# Altium footprint library PCB_PTUController.PcbLib: 106 footprints (part 4 of 7)
Each footprint in its own frame and in the unit in brackets; x right, y up, seen from the top. Pads: shape width x height; smd on the part's side, far side on the other; paste and mask are expansions set on the pad; w line width, h text height; cw(c..) or ccw(c..) is an arc to the next point about the centre after c.
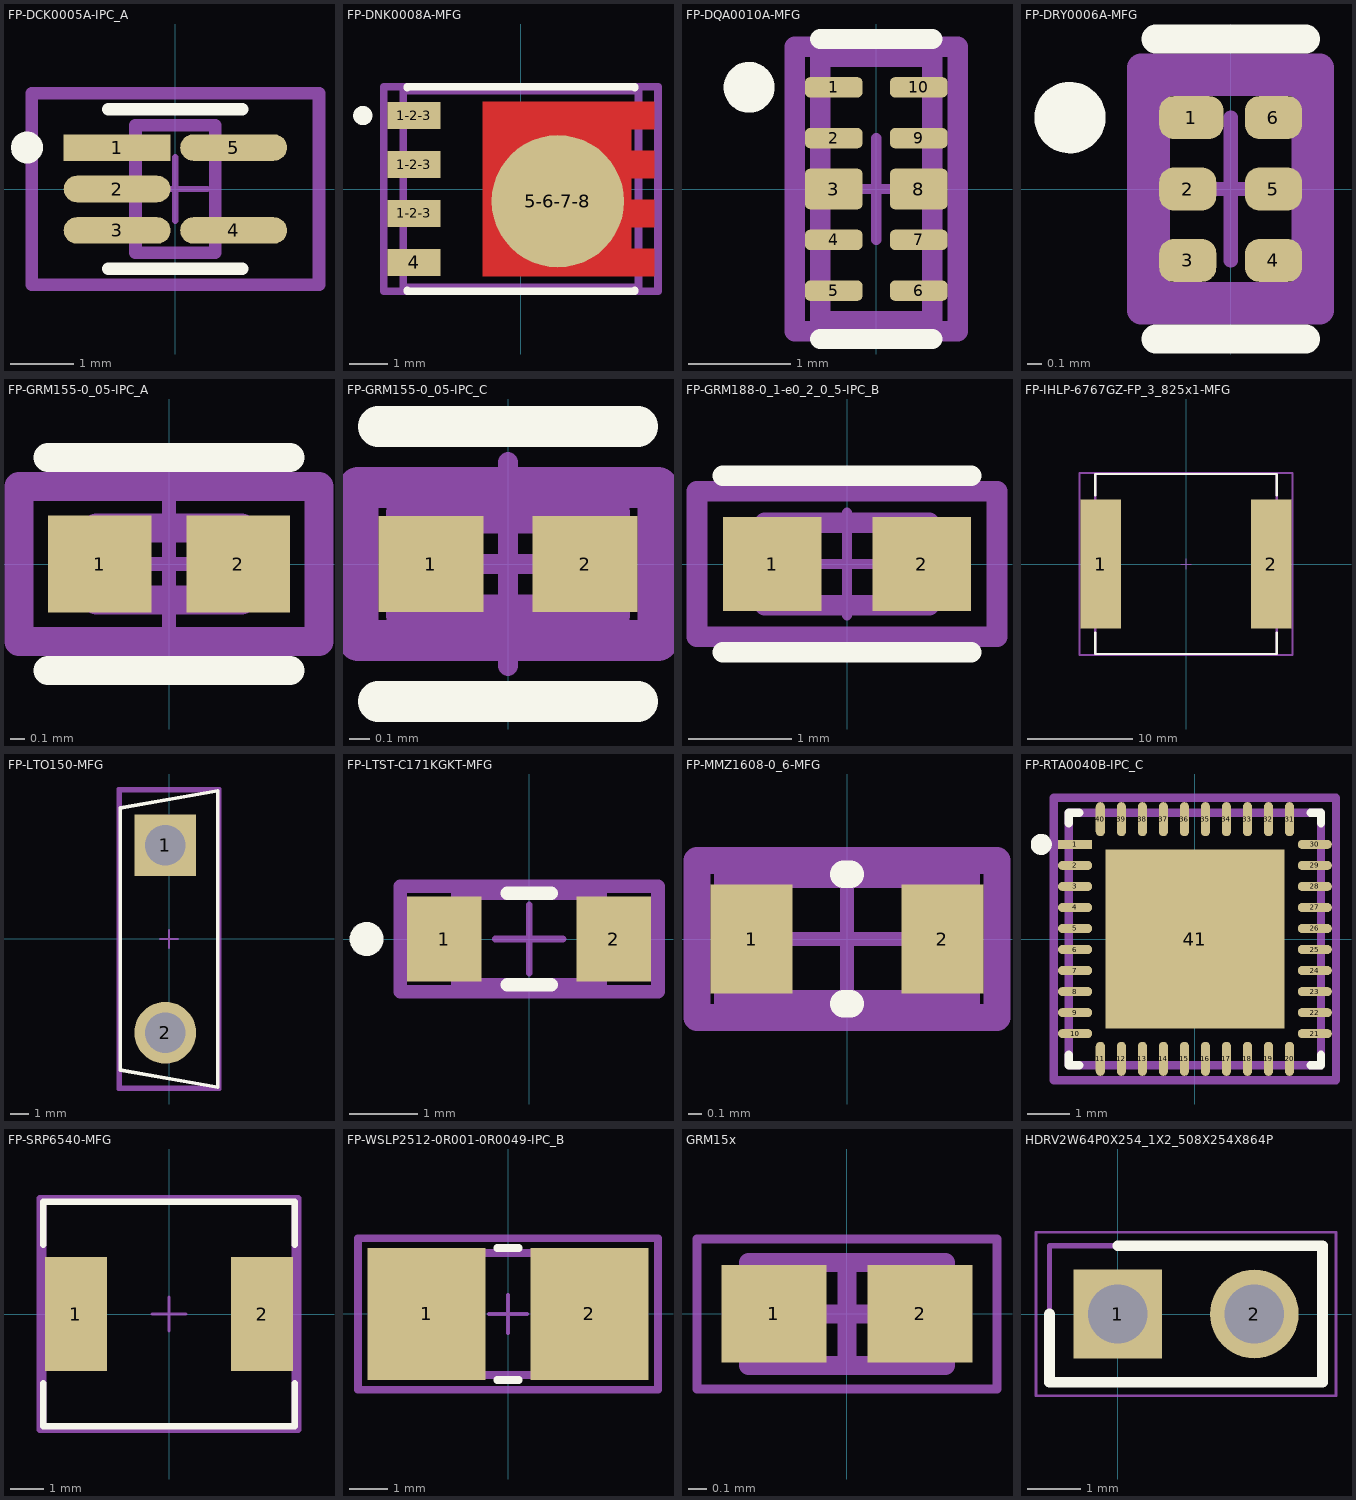
[diagram p3: the footprints below, top view; thin cyan lines are the x and y axes]

## FP-DCK0005A-IPC_A [mm]
pads (5):
  rect 1.677x0.416 smd paste+0 mask+0: 1(-0.914,0.65)
  rrect100% 1.677x0.416 smd paste+0 mask+0: 2(-0.914,0) 3(-0.914,-0.65) 4(0.914,-0.65) 5(0.914,0.65)
Top Overlay:
  circle w0.25: c-2.327,0.65 r0.125
  lines w0.2: -1.05,-1.25 1.05,-1.25 ; -1.05,1.25 1.05,1.25
Top Assembly:
  lines w0.2: -2.252,-1.5 2.252,-1.5 2.252,1.5 -2.252,1.5 -2.252,-1.5
  text ".Designator" at 0,0 h1
Top 3D Body:
  lines w0.2: -0.625,-1 0.625,-1 0.625,1 -0.625,1 -0.625,-1
Top Courtyard:
  lines w0.2: -2.252,-1.5 2.252,-1.5 2.252,1.5 -2.252,1.5 -2.252,-1.5
Top Component Center:
  lines w0.1: -0.5,0 0.5,0 ; 0,-0.5 0,0.5
3D body "IC_Texas_Instruments_SN74AUC1G125DCKR_eec.STEP": height 0.25, standoff 0, extent -2.252,-1.5 2.252,1.5

## FP-DNK0008A-MFG [mm]
pads (5):
  rect 1.372x0.71 smd paste-1000 mask+0: 1-2-3(-2.77,-0.635) 1-2-3(-2.77,0.635) 1-2-3(-2.77,1.905) 4(-2.77,-1.905)
  round 3.434 smd paste-1000 mask+0: 5-6-7-8(0.958,-0.318)
Top Layer:
  region: -0.984,-2.26 3.456,-2.26 3.456,-1.55 2.866,-1.55 2.866,-0.99 3.456,-0.99 3.456,-0.28 2.866,-0.28 2.866,0.28 3.456,0.28 3.456,0.99 2.866,0.99 2.866,1.55 3.456,1.55 3.456,2.26 -0.984,2.26
Top Overlay:
  circle w0.25: c-4.1,1.905 r0.125
  lines w0.2: -2.95,-2.635 -2.95,-2.65 2.95,-2.65 2.95,-2.635 ; -2.95,2.635 -2.95,2.65 2.95,2.65 2.95,2.635
Top Paste:
  rectangle: -3.293,1.624 -2.221,2.186
  rectangle: -3.293,0.354 -2.221,0.916
  rectangle: -3.293,-0.916 -2.221,-0.354
  rectangle: -3.293,-2.186 -2.221,-1.624
  rectangle: 2.527,1.651 3.293,2.159
  rectangle: 2.527,0.381 3.293,0.889
  rectangle: 2.527,-0.889 3.293,-0.381
  rectangle: 2.527,-2.159 3.293,-1.651
  rectangle: 0.947,1.196 2.241,1.942
  rectangle: 0.947,0.15 2.241,0.896
  rectangle: 0.947,-0.896 2.241,-0.15
  rectangle: 0.947,-1.942 2.241,-1.196
  rectangle: -0.697,1.196 0.597,1.942
  rectangle: -0.697,0.15 0.597,0.896
  rectangle: -0.697,-0.896 0.597,-0.15
  rectangle: -0.697,-1.942 0.597,-1.196
Top Assembly:
  lines w0.2: -3.556,-2.65 3.556,-2.65 3.556,2.65 -3.556,2.65 -3.556,-2.65
  text ".Designator" at 0,0 h1
Top 3D Body:
  lines w0.2: -3.05,-2.55 3.05,-2.55 3.05,2.55 -3.05,2.55 -3.05,-2.55
Top Courtyard:
  lines w0.2: -3.556,-2.65 3.556,-2.65 3.556,2.65 -3.556,2.65 -3.556,-2.65
Top Component Center:
  lines w0.1: -0.5,0 0.5,0 ; 0,-0.5 0,0.5
3D body "Trans_Texas_Instruments_CSD19532Q5B_eec.STEP": height 0.25, standoff 0, extent -3.556,-2.65 3.556,2.65

## FP-DQA0010A-MFG [mm]
pads (10):
  rrect50% 0.565x0.2 smd paste+0 mask+0: 1(-0.417,1) 2(-0.417,0.5) 4(-0.417,-0.5) 5(-0.417,-1) 6(0.417,-1) 7(0.417,-0.5) 9(0.417,0.5) 10(0.417,1)
  rrect25% 0.565x0.4 smd paste-1000 mask+0: 3(-0.417,0) 8(0.417,0)
Top Overlay:
  circle w0.25: c-1.25,1 r0.125
  lines w0.2: -0.55,-1.475 0.55,-1.475 ; -0.55,1.475 0.55,1.475
Top Paste:
  region: -0.65,-0.18 -0.66,-0.18 -0.678,-0.172 -0.692,-0.158 -0.7,-0.14 -0.7,-0.13 -0.7,0.13 -0.7,0.14 -0.692,0.158 -0.678,0.172 -0.66,0.18 -0.65,0.18 -0.185,0.18 -0.175,0.18 -0.157,0.172 -0.143,0.158 -0.135,0.14 -0.135,0.13 -0.135,-0.13 -0.135,-0.14 -0.143,-0.158 -0.157,-0.172 -0.175,-0.18 -0.185,-0.18
  region: 0.7,0.13 0.7,-0.13 0.7,-0.14 0.692,-0.158 0.678,-0.172 0.66,-0.18 0.65,-0.18 0.185,-0.18 0.175,-0.18 0.157,-0.172 0.143,-0.158 0.135,-0.14 0.135,-0.13 0.135,0.13 0.135,0.14 0.143,0.158 0.157,0.172 0.175,0.18 0.185,0.18 0.65,0.18 0.66,0.18 0.678,0.172 0.692,0.158 0.7,0.14
Top Assembly:
  lines w0.2: -0.8,-1.4 0.8,-1.4 0.8,1.4 -0.8,1.4 -0.8,-1.4
  text ".Designator" at 0,0.188 h1
Top 3D Body:
  lines w0.2: -0.55,-1.3 0.55,-1.3 0.55,1.3 -0.55,1.3 -0.55,-1.3
Top Courtyard:
  lines w0.2: -0.8,-1.4 0.8,-1.4 0.8,1.4 -0.8,1.4 -0.8,-1.4
Top Component Center:
  lines w0.1: -0.5,0 0.5,0 ; 0,-0.5 0,0.5
3D body "Diode_Texas_Instruments_ESD204DQAR_eec.STEP": height 0.25, standoff 0, extent -0.8,-1.4 0.8,1.4

## FP-DRY0006A-MFG [mm]
pads (6):
  rrect67% 0.45x0.3 smd paste-1000 mask-1000: 1(-0.275,0.5)
  rrect67% 0.4x0.3 smd paste-1000 mask-1000: 2(-0.3,0) 3(-0.3,-0.5) 4(0.3,-0.5) 5(0.3,0) 6(0.3,0.5)
Top Overlay:
  circle w0.25: c-1.125,0.5 r0.125
  lines w0.2: -0.525,-1.05 0.525,-1.05 ; -0.525,1.05 0.525,1.05
Top Paste:
  drawing of 7 lines, arcs and shapes, not listed
Top Solder:
  drawing of 6 lines, arcs and shapes, not listed
Top Assembly:
  lines w0.2: -0.625,-0.85 0.625,-0.85 0.625,0.85 -0.625,0.85 -0.625,-0.85
  text ".Designator" at 0,0.188 h1
Top 3D Body:
  lines w0.2: -0.525,-0.75 0.525,-0.75 0.525,0.75 -0.525,0.75 -0.525,-0.75
Top Courtyard:
  lines w0.2: -0.625,-0.85 0.625,-0.85 0.625,0.85 -0.625,0.85 -0.625,-0.85
Top Component Center:
  lines w0.1: -0.5,0 0.5,0 ; 0,-0.5 0,0.5
3D body "IC_Texas_Instruments_TLV4062DRYR_eec.STEP": height 0.6, standoff 0, extent -0.5,-0.725 0.5,0.725

## FP-GRM155-0_05-IPC_A [mm]
pads (2):
  rect 0.715x0.672 smd paste+0 mask+0: 1(-0.479,0) 2(0.479,0)
Top Overlay:
  lines w0.2: -0.836,-0.736 0.836,-0.736 ; -0.836,0.736 0.836,0.736
Top Assembly:
  lines w0.2: -1.036,-0.536 1.036,-0.536 1.036,0.536 -1.036,0.536 -1.036,-0.536
  text ".Designator" at 0,0.188 h1
Top 3D Body:
  lines w0.2: -0.5,-0.25 0.5,-0.25 0.5,0.25 -0.5,0.25 -0.5,-0.25
Top Courtyard:
  lines w0.2: -1.036,-0.536 1.036,-0.536 1.036,0.536 -1.036,0.536 -1.036,-0.536
Top Component Center:
  lines w0.1: -0.5,0 0.5,0 ; 0,-0.5 0,0.5
3D body "Cap_Murata_GRM1552C1H271GA01J_eec.STEP": height 0.25, standoff 0, extent -1.036,-0.536 1.036,0.536

## FP-GRM155-0_05-IPC_C [mm]
pads (2):
  rect 0.515x0.472 smd paste+0 mask+0: 1(-0.379,0) 2(0.379,0)
Top Overlay:
  lines w0.2: -0.636,-0.675 0.636,-0.675 ; -0.636,0.675 0.636,0.675
Top Assembly:
  lines w0.2: -0.736,-0.375 -0.736,0.375 0.736,0.375 0.736,-0.375 -0.736,-0.375
  text ".Designator" at 0,0.188 h1
Top 3D Body:
  lines w0.2: -0.5,-0.25 -0.5,0.25 0.5,0.25 0.5,-0.25 -0.5,-0.25
Top Courtyard:
  lines w0.2: -0.736,-0.375 -0.736,0.375 0.736,0.375 0.736,-0.375 -0.736,-0.375
Top Component Center:
  lines w0.1: -0.5,0 0.5,0 ; 0,-0.5 0,0.5
3D body "Cap_Murata_GRM1552C1H271GA01J_eec.STEP": height 0.25, standoff 0, extent -0.736,-0.375 0.736,0.375

## FP-GRM188-0_1-e0_2_0_5-IPC_B [mm]
pads (2):
  rect 0.959x0.912 smd paste+0 mask+0: 1(-0.727,0) 2(0.727,0)
Top Overlay:
  lines w0.2: -1.206,-0.856 1.206,-0.856 ; -1.206,0.856 1.206,0.856
Top Assembly:
  lines w0.2: -1.456,-0.706 1.456,-0.706 1.456,0.706 -1.456,0.706 -1.456,-0.706
  text ".Designator" at 0,0.188 h1
Top 3D Body:
  lines w0.2: -0.8,-0.4 0.8,-0.4 0.8,0.4 -0.8,0.4 -0.8,-0.4
Top Courtyard:
  lines w0.2: -1.456,-0.706 1.456,-0.706 1.456,0.706 -1.456,0.706 -1.456,-0.706
Top Component Center:
  lines w0.1: -0.5,0 0.5,0 ; 0,-0.5 0,0.5
3D body "Cap_Murata_GRM188R61E225KA12D_eec.STEP": height 0.25, standoff 0, extent -1.456,-0.706 1.456,0.706

## FP-IHLP-6767GZ-FP_3_825x1-MFG [mm]
pads (2):
  rect 3.825x12.32 smd paste+0 mask+0: 1(-8.117,0) 2(8.117,0)
Top Overlay:
  lines w0.2: -8.638,-6.535 -8.638,-8.575 8.638,-8.575 8.638,-6.535 ; -8.638,6.535 -8.638,8.575 8.638,8.575 8.638,6.535
Top Assembly:
  lines w0.2: -10.13,-8.675 10.13,-8.675 10.13,8.675 -10.13,8.675 -10.13,-8.675
  text ".Designator" at 0,0.188 h1
Top 3D Body:
  lines w0.2: -8.638,-8.575 8.638,-8.575 8.638,8.575 -8.638,8.575 -8.638,-8.575
Top Courtyard:
  lines w0.2: -10.13,-8.675 10.13,-8.675 10.13,8.675 -10.13,8.675 -10.13,-8.675
Top Component Center:
  lines w0.1: -0.5,0 0.5,0 ; 0,-0.5 0,0.5
3D body "Ind_Vishay_IHLP6767GZER1R5M11_eec.STEP": height 0.25, standoff 0, extent -10.13,-8.675 10.13,8.675

## FP-LTO150-MFG [mm]
pads (2):
  rect 3.35x3.35 hole 2.2 paste-2539.97 mask+0: 1(-0.2,5.08)
  round 3.35 hole 2.2 paste-2539.97 mask+0: 2(-0.2,-5.08)
Top Overlay:
  lines w0.2: -2.65,-7.1 2.65,-8.03 2.65,8.03 -2.65,7.1 -2.65,-7.1
Top Assembly:
  lines w0.2: -2.75,-8.13 -2.75,8.13 2.75,8.13 2.75,-8.13 -2.75,-8.13
  text ".Designator" at 0,0 h1
Top 3D Body:
  lines w0.2: -2.65,-8.03 -2.65,8.03 2.65,8.03 2.65,-8.03 -2.65,-8.03
Top Courtyard:
  lines w0.2: -2.75,-8.13 -2.75,8.13 2.75,8.13 2.75,-8.13 -2.75,-8.13
Top Component Center:
  lines w0.1: -0.5,0 0.5,0 ; 0,-0.5 0,0.5
3D body "Res_Vishay_LTO150F1R000JTE3_eec.STEP": height 0.25, standoff 0, extent -2.75,-8.13 2.75,8.13

## FP-LTST-C171KGKT-MFG [mm]
pads (2):
  rect 1.1x1.25 smd paste+0 mask+0: 1(-1.25,0) 2(1.25,0)
Top Overlay:
  circle w0.25: c-2.4,0 r0.125
  lines w0.2: -0.325,-0.675 0.325,-0.675 ; -0.325,0.675 0.325,0.675
Top Assembly:
  lines w0.2: -1.9,-0.775 1.9,-0.775 1.9,0.775 -1.9,0.775 -1.9,-0.775
  text ".Designator" at 0,0 h1
Top 3D Body:
  lines w0.2: -1.05,-0.675 1.05,-0.675 1.05,0.675 -1.05,0.675 -1.05,-0.675
Top Courtyard:
  lines w0.2: -1.9,-0.775 1.9,-0.775 1.9,0.775 -1.9,0.775 -1.9,-0.775
Top Component Center:
  lines w0.1: -0.5,0 0.5,0 ; 0,-0.5 0,0.5
3D body "Diode_Lite-On_LTST-C171KGKT_eec.STEP": height 0.25, standoff 0, extent -1.9,-0.775 1.9,0.775

## FP-MMZ1608-0_6-MFG [mm]
pads (2):
  rect 0.6x0.8 smd paste+0 mask+0: 1(-0.7,0) 2(0.7,0)
Top Overlay:
  lines w0.2: -0.025,-0.475 0.025,-0.475 ; -0.025,0.475 0.025,0.475
Top Assembly:
  lines w0.2: -1.1,-0.575 1.1,-0.575 1.1,0.575 -1.1,0.575 -1.1,-0.575
  text ".Designator" at 0,0.188 h1
Top 3D Body:
  lines w0.2: -0.875,-0.475 0.875,-0.475 0.875,0.475 -0.875,0.475 -0.875,-0.475
Top Courtyard:
  lines w0.2: -1.1,-0.575 1.1,-0.575 1.1,0.575 -1.1,0.575 -1.1,-0.575
Top Component Center:
  lines w0.1: -0.5,0 0.5,0 ; 0,-0.5 0,0.5
3D body "FBead_TDK_MMZ1608B121CTAH0_eec.STEP": height 0.25, standoff 0, extent -1.1,-0.575 1.1,0.575

## FP-RTA0040B-IPC_C [mm]
pads (41):
  rect 0.81x0.219 smd paste+0 mask+0: 1(-2.851,2.25)
  rrect100% 0.81x0.219 smd paste+0 mask+0: 2(-2.851,1.75) 3(-2.851,1.25) 4(-2.851,0.75) 5(-2.851,0.25) 6(-2.851,-0.25) 7(-2.851,-0.75) 8(-2.851,-1.25) 9(-2.851,-1.75) 10(-2.851,-2.25) 21(2.851,-2.25) 22(2.851,-1.75) 23(2.851,-1.25) 24(2.851,-0.75) 25(2.851,-0.25) 26(2.851,0.25) 27(2.851,0.75) 28(2.851,1.25) 29(2.851,1.75) 30(2.851,2.25)
  rrect100% 0.219x0.81 smd paste+0 mask+0: 11(-2.25,-2.851) 12(-1.75,-2.851) 13(-1.25,-2.851) 14(-0.75,-2.851) 15(-0.25,-2.851) 16(0.25,-2.851) 17(0.75,-2.851) 18(1.25,-2.851) 19(1.75,-2.851) 20(2.25,-2.851) 31(2.25,2.851) 32(1.75,2.851) 33(1.25,2.851) 34(0.75,2.851) 35(0.25,2.851) 36(-0.25,2.851) 37(-0.75,2.851) 38(-1.25,2.851) 39(-1.75,2.851) 40(-2.25,2.851)
  rect 4.25x4.25 smd paste-1000 mask+0: 41(0,0)
Top Overlay:
  circle w0.25: c-3.656,2.25 r0.125
  lines w0.2: -3,-2.75 -3,-3 -2.75,-3 ; -3,2.75 -3,3 -2.75,3 ; 2.75,-3 3,-3 3,-2.75 ; 2.75,3 3,3 3,2.75
Top Paste:
  rectangle: -1.344,-1.344 1.344,1.344
Top Assembly:
  lines w0.2: -3.356,-3.356 -3.356,3.356 3.356,3.356 3.356,-3.356 -3.356,-3.356
  text ".Designator" at 0,0.188 h1
Top 3D Body:
  lines w0.2: -3,-3 -3,3 3,3 3,-3 -3,-3
Top Courtyard:
  lines w0.2: -3.356,-3.356 -3.356,3.356 3.356,3.356 3.356,-3.356 -3.356,-3.356
Top Component Center:
  lines w0.1: -0.5,0 0.5,0 ; 0,-0.5 0,0.5
3D body "IC_Texas_Instruments_DRV8323SRTAT_eec.STEP": height 0.25, standoff 0, extent -3.356,-3.356 3.356,3.356

## FP-SRP6540-MFG [mm]
pads (2):
  rect 1.85x3.4 smd paste+0 mask+0: 1(-2.775,0) 2(2.775,0)
Top Overlay:
  lines w0.2: -3.75,-2.075 -3.75,-3.35 3.75,-3.35 3.75,-2.075 ; -3.75,2.075 -3.75,3.35 3.75,3.35 3.75,2.075
Top Assembly:
  lines w0.2: -3.85,-3.45 3.85,-3.45 3.85,3.45 -3.85,3.45 -3.85,-3.45
  text ".Designator" at 0,0.188 h1
Top 3D Body:
  lines w0.2: -3.75,-3.35 3.75,-3.35 3.75,3.35 -3.75,3.35 -3.75,-3.35
Top Courtyard:
  lines w0.2: -3.85,-3.45 3.85,-3.45 3.85,3.45 -3.85,3.45 -3.85,-3.45
Top Component Center:
  lines w0.1: -0.5,0 0.5,0 ; 0,-0.5 0,0.5
3D body "Ind_Bourns_SRP6540-1R5M_eec.STEP": height 0.25, standoff 0, extent -3.85,-3.45 3.85,3.45

## FP-WSLP2512-0R001-0R0049-IPC_B [mm]
pads (2):
  rect 3.072x3.439 smd paste+0 mask+0: 1(-2.119,0) 2(2.119,0)
Top Overlay:
  lines w0.2: -0.283,-1.719 0.283,-1.719 ; -0.283,1.719 0.283,1.719
Top Assembly:
  lines w0.2: -3.904,-1.969 -3.904,1.969 3.904,1.969 3.904,-1.969 -3.904,-1.969
  text ".Designator" at 0,0.188 h1
Top 3D Body:
  lines w0.2: -3.175,-1.59 -3.175,1.59 3.175,1.59 3.175,-1.59 -3.175,-1.59
Top Courtyard:
  lines w0.2: -3.904,-1.969 -3.904,1.969 3.904,1.969 3.904,-1.969 -3.904,-1.969
Top Component Center:
  lines w0.1: -0.5,0 0.5,0 ; 0,-0.5 0,0.5
3D body "Res_Vishay_WSLP25122L000FEA_eec.STEP": height 0.25, standoff 0, extent -3.904,-1.969 3.904,1.969

## GRM15x [mm] "Chip Capacitor, 2-Leads, Body 1.00x0.50mm, IPC High Density"
height 0.55
pads (2):
  rect 0.56x0.52 smd: 1(-0.39,0) 2(0.39,0)
Top 3D Body:
  lines w0.1: -0.525,-0.275 -0.525,0.275 0.525,0.275 0.525,-0.275 -0.525,-0.275
Top Courtyard:
  lines w0.05: -0.8,-0.4 -0.8,0.4 0.8,0.4 0.8,-0.4 -0.8,-0.4
  lines w0.1: -0.275,0 0.275,0 ; 0,-0.275 0,0.275
3D body: height 0.55, standoff 0, extent -0.275,-0.275 0.275,0.275
3D body: height 0.55, standoff 0, extent -0.525,-0.275 -0.275,0.275
3D body: height 0.55, standoff 0, extent 0.275,-0.275 0.525,0.275

## HDRV2W64P0X254_1X2_508X254X864P [mm]
pads (2):
  rect 1.65x1.65 hole 1.1: 1(0,0)
  round 1.65 hole 1.1: 2(2.54,0)
Top Overlay:
  lines w0.2: -1.27,0 -1.27,-1.27 3.81,-1.27 3.81,1.27 0,1.27
Top 3D Body:
  lines w0.1: -1.27,-1.27 3.81,-1.27 3.81,1.27 -1.27,1.27 -1.27,-1.27
Top Courtyard:
  lines w0.05: -1.52,-1.52 4.06,-1.52 4.06,1.52 -1.52,1.52 -1.52,-1.52
3D body "M20-9990245.stp": height 8.64, standoff -3, extent -1.27,-1.27 3.81,1.27